# Altium schematic symbol library 928814-1.SchLib: 1 symbol
Pins are listed as number, name and electrical type; pins without a type are passive.

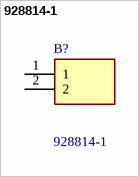
[diagram p0: symbol 928814-1]

## 928814-1
designator B?
Crimp,Faston,tab,90,M,6.35x0.81mm; Manufacturer_Name: TE Connectivity; Geometry.Height: 6mm; Mouser Part Number: 571-928814-1; Mouser Price/Stock: https://www.mouser.co.uk/ProductDetail/TE-Connectivity-AMP/928814-1?qs=pyu0Ngu8oR6IQj1m4jmYEA%3D%3D; Manufacturer_Part_Number: 928814-1; Datasheet Link: http://www.te.com/commerce/DocumentDelivery/DDEController?Action=showdoc&DocId=Catalog+Section%7F82004_FASTON_PCB_Tabs_Receptacles%7F0914%7Fpdf%7FEnglish%7FENG_CS_82004_FASTON_PCB_Tabs_Receptacles_0914.pdf%7F928814-1
footprint 9288141
pins: 1, 2